# Altium schematic symbol library TIE_2025.SchLib: 42 symbols
Pins are listed as number, name and electrical type; pins without a type are passive.

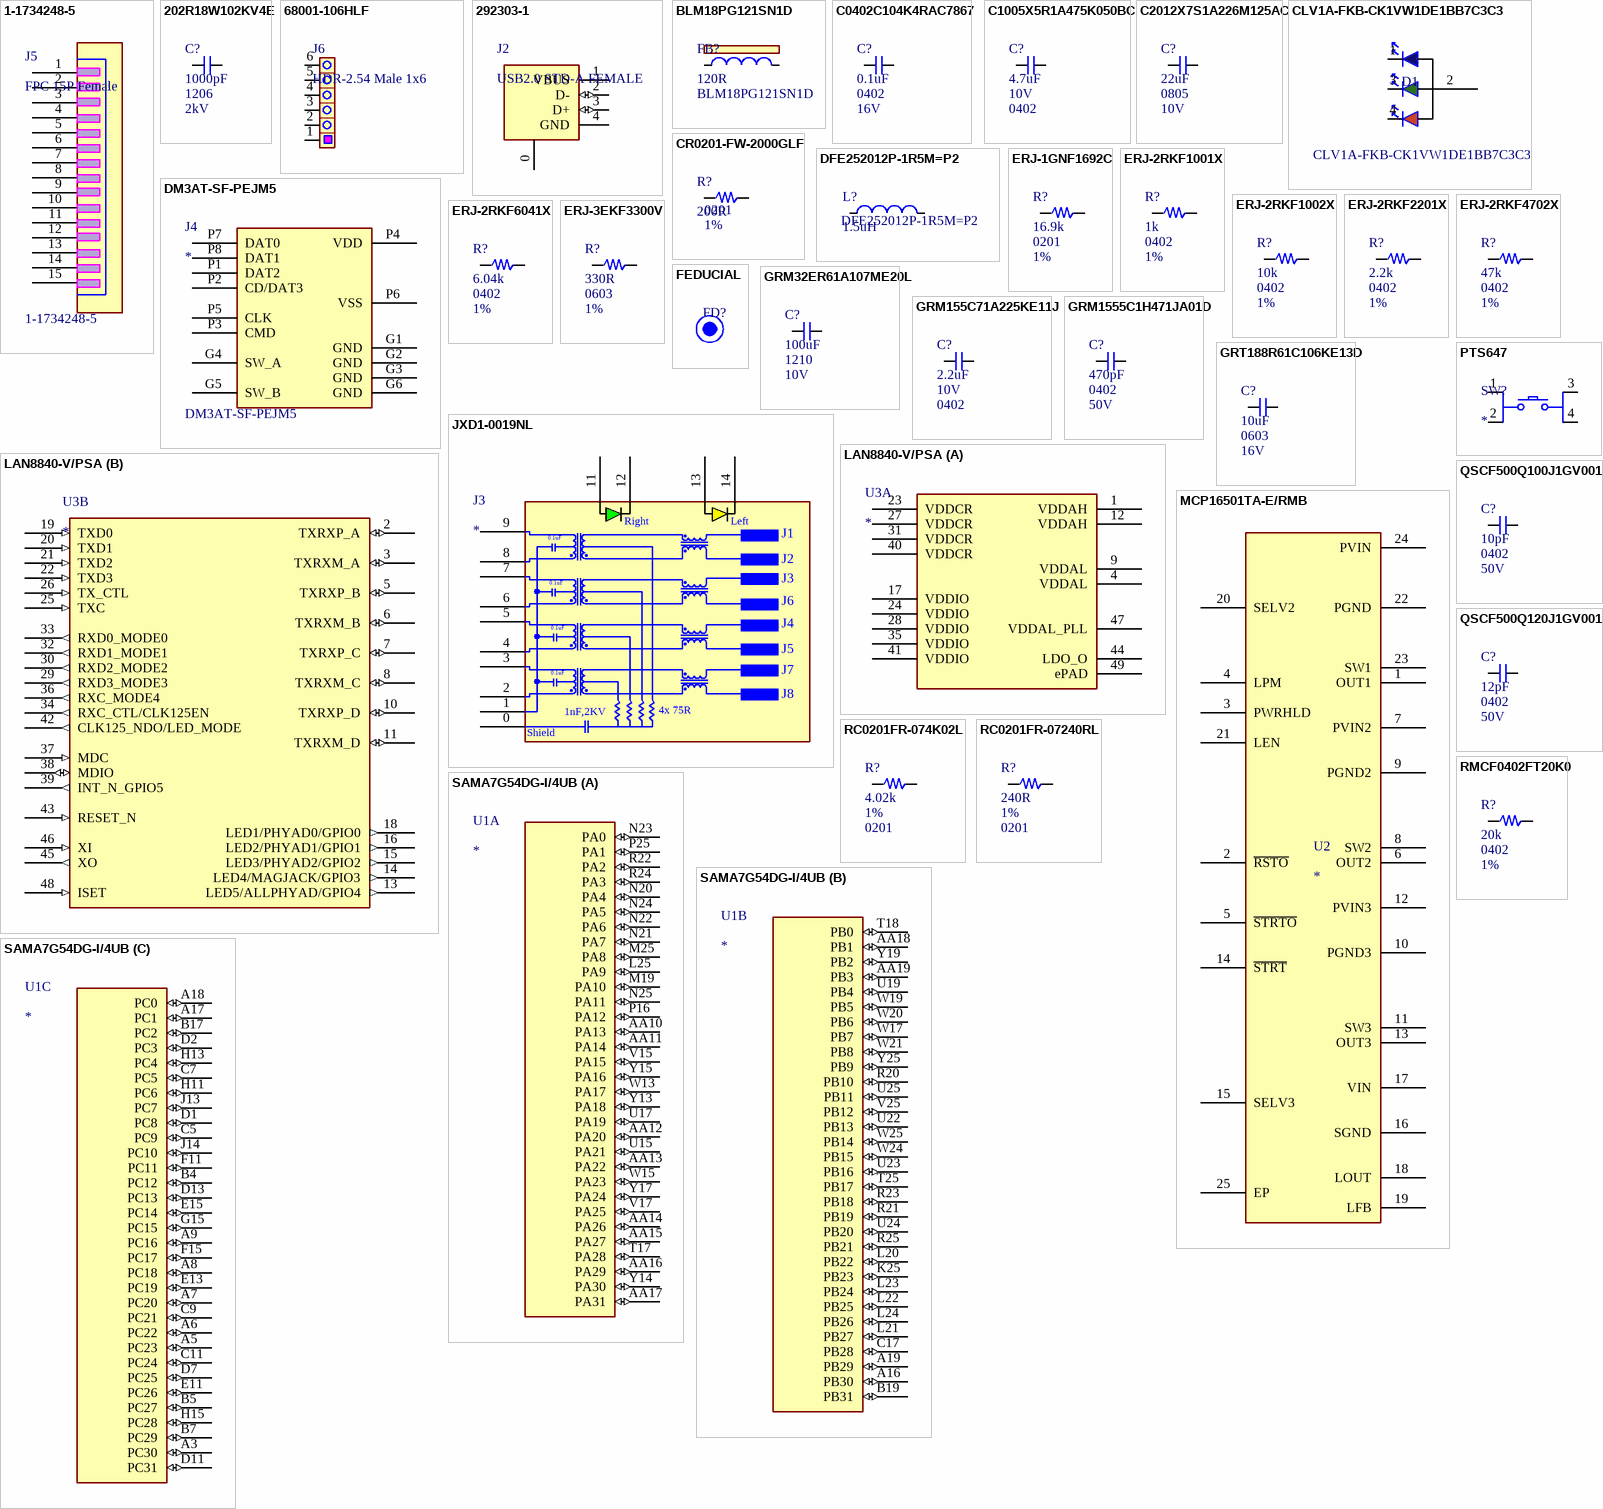
[diagram p0: symbols 1-1734248-5 to SAMA7G54DG-I/4UB]

## 1-1734248-5
designator J5, comment FPC 15P Female  Manufacturer Part Number: 1-1734248-5
CON FPC 1mm 15P Female SMD VERT; Manufacturer: TE Connectivity AMP
footprint 1-1734248-5_1 (CON FPC 1mm 15P Female SMD VERT)
pins: 1, 2, 3, 4, 5, 6, 7, 8, 9, 10, 11, 12, 13, 14, 15

## 202R18W102KV4E
designator C?, comment 1000pF  Rated Voltage: 2kV  Package: 1206
CAP CER 1000pF 2KV 10% X7R SMD 1206; Manufacturer: D3_Johanson Dielectrics Inc; Manufacturer Part Number: 202R18W102KV4E; .Checked_PCB: AI; .Checked_SCH: AI; .Creator: AI
footprint CAP1206
pins: 1, 2

## 68001-106HLF
designator J6, comment HDR-2.54 Male 1x6
CON HDR-2.54 Male 1x6 Gold 5.84MH TH VERT; Manufacturer: FCI; Manufacturer Part Number: 68001-106HLF
footprint 68001-106HLF
pins: 1, 2, 3, 4, 5, 6

## 292303-1
designator J2, comment USB2.0 STD-A FEMALE
CON USB2.0 STD-A FEMALE TH R/A; Manufacturer: TE Connectivity AMP; Manufacturer Part Number: 292303-1
footprint 292303-1
pins: 0   , 1 VBUS, 2 D- (io), 3 D+ (io), 4 GND

## BLM18PG121SN1D
designator FB?, comment 120R  Manufacturer Part Number: BLM18PG121SN1D
FERRITE BEAD 120 OHM 0603 1LN; Manufacturer: Murata; .Checked_PCB: AI; .Checked_SCH: AI; .Creator: AI
footprint FB0603
pins: 1, 2

## C0402C104K4RAC7867
designator C?, comment 0.1uF  Rated Voltage: 16V  Package: 0402
CAP CER 0.1uF 16V 10% X7R SMD 0402; Manufacturer: KEMET; Manufacturer Part Number: C0402C104K4RAC7867; .Checked_PCB: AI; .Checked_SCH: AI; .Creator: AI
footprint CAP0402
pins: 1, 2

## C1005X5R1A475K050BC
designator C?, comment 4.7uF  Package: 0402  Rated Voltage: 10V
CAP CER 4.7uF 10V 10% X5R SMD 0402; Manufacturer: TDK Corporation; Manufacturer Part Number: C1005X5R1A475K050BC; .Checked_PCB: AI; .Checked_SCH: AI; .Creator: AI
footprint CAP0402
pins: 1, 2

## C2012X7S1A226M125AC
designator C?, comment 22uF  Rated Voltage: 10V  Package: 0805
CAP CER 22uF 10V 20% X7S SMD 0805; Manufacturer: TDK Corporation; Manufacturer Part Number: C2012X7S1A226M125AC
footprint CAP0805
pins: 1, 2

## CLV1A-FKB-CK1VW1DE1BB7C3C3
designator D1, comment Manufacturer Part Number: CLV1A-FKB-CK1VW1DE1BB7C3C3  (hidden comment: APT1608SRCPRV)
DIO LED TRI RED, GREEN, BLUE 2V, 3.2V, 3.2V 20mA, 20mA, / 20mA SMD 4-PLCC; Manufacturer: Cree Inc.; .Checked_PCB: IC; .Checked_SCH: IC
footprint CLV1A-FKB-CK1VW1DE1BB7C3C3
pins: 1, 2, 3, 4

## CR0201-FW-2000GLF
designator R?, comment 200R  Tolerance: 1%  Package: 0201
RES TKF 200R 1% 1/20W SMD 0201; Manufacturer: Bourns Inc.; Manufacturer Part Number: CR0201-FW-2000GLF
footprint RES0201
pins: 1, 2

## DFE252012P-1R5M=P2
designator L?, comment 1.5uH  Manufacturer Part Number: DFE252012P-1R5M=P2
INDUCTOR 1.5uH 3.5A 20% SMD 1008; Manufacturer: Murata Electronics North; .Checked_PCB: AI; .Checked_SCH: AI; .Creator: AI; Parameter 1: *
footprint INDUCTOR1008
pins: 1, 2

## DM3AT-SF-PEJM5
designator J4  Manufacturer Part Number: DM3AT-SF-PEJM5
CON FLASH microSD 8+2P Push-Push SMD; Manufacturer: Hirose Electric Co Ltd
footprint DM3AT-SF-PEJM5
pins: G1 GND, G2 GND, G3 GND, G4 SW_A, G5 SW_B, G6 GND, P1 DAT2, P2 CD/DAT3, P3 CMD, P4 VDD, P5 CLK, P6 VSS, P7 DAT0, P8 DAT1

## ERJ-1GNF1692C
designator R?, comment 16.9k  Tolerance: 1%  Package: 0201
RES TKF 16.9k 1% 1/20W SMD 0201; Manufacturer: Panasonic Electronic; Manufacturer Part Number: ERJ-1GNF1692C
footprint RES0201
pins: 1, 2

## ERJ-2RKF1001X
designator R?, comment 1k  Tolerance: 1%  Package: 0402
RES TKF 1k 1% 1/10W SMD 0402; Manufacturer: Panasonic; Manufacturer Part Number: ERJ-2RKF1001X
footprint RES0402
pins: 1, 2

## ERJ-2RKF1002X
designator R?, comment 10k  Tolerance: 1%  Package: 0402
RES TKF 10k 1% 1/10W SMD 0402; Manufacturer: Panasonic; Manufacturer Part Number: ERJ-2RKF1002X
footprint RES0402
pins: 1, 2

## ERJ-2RKF2201X
designator R?, comment 2.2k  Tolerance: 1%  Package: 0402
RES TKF 2.2k 1% 1/10W SMD 0402; Manufacturer: Panasonic; Manufacturer Part Number: ERJ-2RKF2201X
footprint RES0402
pins: 1, 2

## ERJ-2RKF4702X
designator R?, comment 47k  Tolerance: 1%  Package: 0402
RES TKF 47k 1% 1/10W SMD 0402 AEC-Q200; Manufacturer: Panasonic - ECG; Manufacturer Part Number: ERJ-2RKF4702X
footprint RES0402
pins: 1, 2

## ERJ-2RKF6041X
designator R?, comment 6.04k  Tolerance: 1%  Package: 0402
RES TKF 6.04k 1% 1/10W SMD 0402 AEC-Q200; Manufacturer: Panasonic Electronic; Manufacturer Part Number: ERJ-2RKF6041X
footprint RES0402
pins: 1, 2

## ERJ-3EKF3300V
designator R?, comment 330R  Tolerance: 1%  Package: 0603
RES TKF 330R 1% 1/10W SMD 0603; Manufacturer: Panasonic; Manufacturer Part Number: ERJ-3EKF3300V; .Checked_PCB: IC; .Checked_SCH: IC; .Creator: IC
footprint RES0603
pins: 1, 2

## FEDUCIAL
designator FD?, comment FID1X2R  (value not drawn)  (no BOM)
FEDUCIAL; Manufacturer: NA; .Creator: Ionut Chirilus; Manufacturer Part Number: NA
footprint TestPoint

## GRM32ER61A107ME20L
designator C?, comment 100uF  Rated Voltage: 10V  Package: 1210
CAP CER 100uF 10V 20% X5R SMD 1210; Manufacturer: Murata Electronics North; Manufacturer Part Number: GRM32ER61A107ME20L; .Checked_PCB: IC; .Checked_SCH: IC
footprint CAP1210
pins: 1, 2

## GRM155C71A225KE11J
designator C?, comment 2.2uF  Package: 0402  Rated Voltage: 10V
CAP CER 2.2uF 10V 10% X7S SMD 0402; Manufacturer: Murata; Manufacturer Part Number: GRM155C71A225KE11J; .Checked_PCB: AI; .Checked_SCH: AI; .Creator: AI
footprint CAP0402
pins: 1, 2

## GRM1555C1H471JA01D
designator C?, comment 470pF  Rated Voltage: 50V  Package: 0402
CAP CER 470pF 50V 5% NP0 SMD 0402; Manufacturer: Murata; Manufacturer Part Number: GRM1555C1H471JA01D; .Checked_PCB: AI; .Checked_SCH: AI; .Creator: AI
footprint CAP0402
pins: 1, 2

## GRT188R61C106KE13D
designator C?, comment 10uF  Rated Voltage: 16V  Pacakage: 0603
CAP CER 10uF 16V 10% X5R SMD 0603 AEC-Q200; Manufacturer: Murata; Manufacturer Part Number: GRT188R61C106KE13D; .Checked_PCB: IC; .Checked_SCH: IC; .Creator: IC
footprint CAP0603
pins: 1, 2

## JXD1-0019NL
designator J3
CON MODULAR JACK RJ45 10/100/1000 MAGNETICS 2xLEDs / SHIELD TH R/A; Manufacturer: Pulse Electronics; Manufacturer Part Number: JXD1-0019NL
footprint JXD1-0019NL
pins: 0, 1, 2, 3, 4, 5, 6, 7, 8, 9, 11, 12, 13, 14
text: Right; Left; 0.1uF; J1; J2; J6; J4; J5; J7; J8; 1nF,2KV; 4x 75R; Shield

## LAN8840-V/PSA
designator U3
MCHP INTERFACE ETHERNET LAN8840 QFN-48; Manufacturer: Microchip Technology; Manufacturer Part Number: LAN8840-V/PSA
footprint QFN-48
part A pins: 1 VDDAH, 4 VDDAL, 9 VDDAL, 12 VDDAH, 17 VDDIO, 23 VDDCR, 24 VDDIO, 27 VDDCR, 28 VDDIO, 31 VDDCR, 35 VDDIO, 40 VDDCR, 41 VDDIO, 44 LDO_O, 47 VDDAL_PLL, 49 ePAD
part B pins: 2 TXRXP_A (io), 3 TXRXM_A (io), 5 TXRXP_B (io), 6 TXRXM_B (io), 7 TXRXP_C (io), 8 TXRXM_C (io), 10 TXRXP_D (io), 11 TXRXM_D (io), 13 LED5/ALLPHYAD/GPIO4 (out), 14 LED4/MAGJACK/GPIO3 (out), 15 LED3/PHYAD2/GPIO2 (out), 16 LED2/PHYAD1/GPIO1 (out), 18 LED1/PHYAD0/GPIO0 (out), 19 TXD0 (in), 20 TXD1 (in), 21 TXD2 (in), 22 TXD3 (in), 25 TXC (in), 26 TX_CTL (in), 29 RXD3_MODE3 (out), 30 RXD2_MODE2 (out), 32 RXD1_MODE1 (out), 33 RXD0_MODE0 (out), 34 RXC_CTL/CLK125EN (out), 36 RXC_MODE4 (out), 37 MDC (in), 38 MDIO (io), 39 INT_N_GPIO5 (out), 42 CLK125_NDO/LED_MODE (out), 43 RESET_N (in), 45 XO (out), 46 XI (in), 48 ISET (in)

## MCP16501TA-E/RMB
designator U2
MCHP ANALOG PMIC SWITCHER Buck ADJ MCP16501TA-E/RMB / QFN-24; Manufacturer: Microchip Technology; Manufacturer Part Number: MCP16501TA-E/RMB
footprint QFN-24
pins: 1 OUT1, 2 ~{RSTO}, 3 PWRHLD, 4 LPM, 5 ~{STRTO}, 6 OUT2, 7 PVIN2, 8 SW2, 9 PGND2, 10 PGND3, 11 SW3, 12 PVIN3, 13 OUT3, 14 ~{STRT}, 15 SELV3, 16 SGND, 17 VIN, 18 LOUT, 19 LFB, 20 SELV2, 21 LEN, 22 PGND, 23 SW1, 24 PVIN, 25 EP

## PTS647
designator SW?
SWITCH TACT SPST 12V 50mA PTS 647 SK38 SMTR2 LFSSMD; Manufacturer: C&K; Datasheet Link: https://datasheet.datasheetarchive.com/originals/distributors/Datasheets_SAMA/dda6c2a9a64375c9ffe9508ecade46cd.pdf; Height: 3.8mm; Arrow Part Number: PTS 647 SK38 SMTR2 LFS; Arrow Price/Stock: https://www.arrow.com/en/products/pts-647-sk38-smtr2-lfs/ck?region=europe; Manufacturer Part Number: PTS 647 SK38 SMTR2 LFS
footprint PTS 647 SK38 SMTR2 LFS
pins: 1, 2, 3, 4

## QSCF500Q100J1GV001T
designator C?, comment 10pF  Rated Voltage: 50V  Package: 0402
CAP CER 10pF 50V 5% C0G/NP0 SMD 0402; Manufacturer: Johanson Technology; Manufacturer Part Number: QSCF500Q100J1GV001T; .Checked_PCB: AI; .Checked_SCH: AI; .Creator: AI
footprint CAP0402
pins: 1, 2

## QSCF500Q120J1GV001T
designator C?, comment 12pF  Rated Voltage: 50V  Package: 0402
CAP CER 12pF 50V 5% C0G/NP0 SMD 0402; Manufacturer: Johanson Technology; Manufacturer Part Number: QSCF500Q120J1GV001T; .Checked_PCB: AI; .Checked_SCH: AI; .Creator: AI
footprint CAP0402
pins: 1, 2

## RC0201FR-074K02L
designator R?, comment 4.02k  Package: 0201  Tolerance: 1%
RES TKF 4.02k 1% 1/20W SMD 0201; Manufacturer: Yageo; Manufacturer Part Number: RC0201FR-074K02L
footprint RES0201
pins: 1, 2

## RC0201FR-07240RL
designator R?, comment 240R  Package: 0201  Tolerance: 1%
RES TKF 240R 1% 1/20W SMD 0201; Manufacturer: Yageo; Manufacturer Part Number: RC0201FR-07240RL
footprint RES0201
pins: 1, 2

## RMCF0402FT20K0
designator R?, comment 20k  Tolerance: 1%  Package: 0402
RES TKF 20k 1% 1/10W SMD 0402; Manufacturer: Stackpole Electronics Inc; Manufacturer Part Number: RMCF0402FT20K0
footprint RES0402
pins: 1, 2

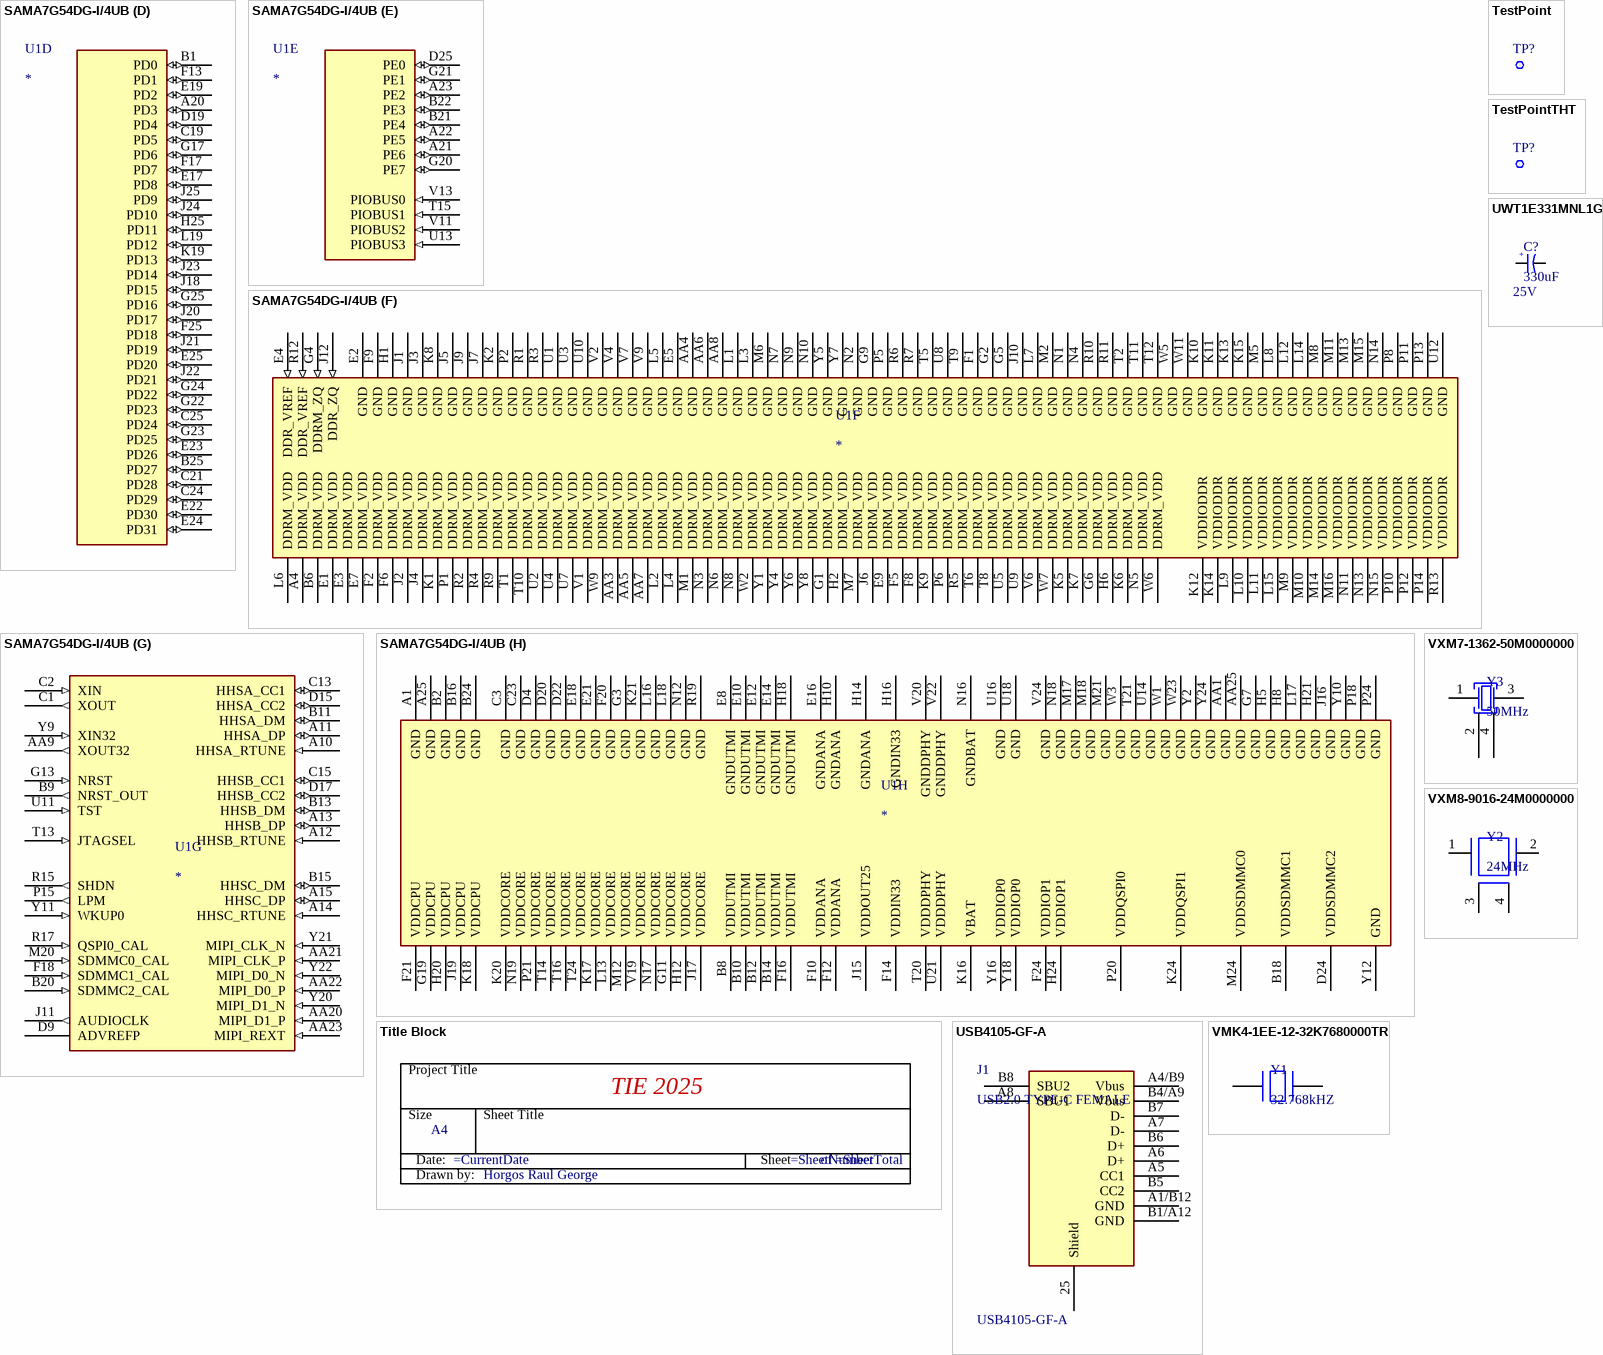
[diagram p1: symbols SAMA7G54DG-I/4UB to VXM8-9016-24M0000000]

## SAMA7G54DG-I/4UB
designator U1
MCHP MPU SiP 32-BIT Cortex-A7 1000MHz 128kB 2Gbit / SAMA7G54D2G-I/4UB LFBGA-427; Manufacturer: Microchip Technology; Manufacturer Part Number: SAMA7G54DG-I/4UB
footprint BGA427C80P25X21_2100X1800X120
part A pins: AA10 PA13 (io), AA11 PA14 (io), AA12 PA20 (io), AA13 PA22 (io), AA14 PA26 (io), AA15 PA27 (io), AA16 PA29 (io), AA17 PA31 (io), L25 PA9 (io), M19 PA10 (io), M25 PA8 (io), N20 PA4 (io), N21 PA7 (io), N22 PA6 (io), N23 PA0 (io), N24 PA5 (io), N25 PA11 (io), P16 PA12 (io), P25 PA1 (io), R22 PA2 (io), R24 PA3 (io), T17 PA28 (io), U15 PA21 (io), U17 PA19 (io), V15 PA15 (io), V17 PA25 (io), W13 PA17 (io), W15 PA23 (io), Y13 PA18 (io), Y14 PA30 (io), Y15 PA16 (io), Y17 PA24 (io)
part B pins: A16 PB30 (io), A19 PB29 (io), AA18 PB1 (io), AA19 PB3 (io), B19 PB31 (io), C17 PB28 (io), K25 PB23 (io), L20 PB22 (io), L21 PB27 (io), L22 PB25 (io), L23 PB24 (io), L24 PB26 (io), R20 PB10 (io), R21 PB19 (io), R23 PB18 (io), R25 PB21 (io), T18 PB0 (io), T25 PB17 (io), U19 PB4 (io), U22 PB13 (io), U23 PB16 (io), U24 PB20 (io), U25 PB11 (io), V25 PB12 (io), W17 PB7 (io), W19 PB5 (io), W20 PB6 (io), W21 PB8 (io), W24 PB15 (io), W25 PB14 (io), Y19 PB2 (io), Y25 PB9 (io)
part C pins: A3 PC30 (io), A5 PC23 (io), A6 PC22 (io), A7 PC20 (io), A8 PC18 (io), A9 PC16 (io), A17 PC1 (io), A18 PC0 (io), B4 PC12 (io), B5 PC27 (io), B7 PC29 (io), B17 PC2 (io), C5 PC9 (io), C7 PC5 (io), C9 PC21 (io), C11 PC24 (io), D1 PC8 (io), D2 PC3 (io), D7 PC25 (io), D11 PC31 (io), D13 PC13 (io), E11 PC26 (io), E13 PC19 (io), E15 PC14 (io), F11 PC11 (io), F15 PC17 (io), G15 PC15 (io), H11 PC6 (io), H13 PC4 (io), H15 PC28 (io), J13 PC7 (io), J14 PC10 (io)
part D pins: A20 PD3 (io), B1 PD0 (io), B25 PD27 (io), C19 PD5 (io), C21 PD28 (io), C24 PD29 (io), C25 PD24 (io), D19 PD4 (io), E17 PD8 (io), E19 PD2 (io), E22 PD30 (io), E23 PD26 (io), E24 PD31 (io), E25 PD20 (io), F13 PD1 (io), F17 PD7 (io), F25 PD18 (io), G17 PD6 (io), G22 PD23 (io), G23 PD25 (io), G24 PD22 (io), G25 PD16 (io), H25 PD11 (io), J18 PD15 (io), J20 PD17 (io), J21 PD19 (io), J22 PD21 (io), J23 PD14 (io), J24 PD10 (io), J25 PD9 (io), K19 PD13 (io), L19 PD12 (io)
part E pins: A21 PE6 (io), A22 PE5 (io), A23 PE2 (io), B21 PE4 (io), B22 PE3 (io), D25 PE0 (io), G20 PE7 (io), G21 PE1 (io), T15 PIOBUS1 (in), U13 PIOBUS3 (in), V11 PIOBUS2 (in), V13 PIOBUS0 (in)
part F pins: A4 DDRM_VDD, AA3 DDRM_VDD, AA4 GND, AA5 DDRM_VDD, AA6 GND, AA7 DDRM_VDD, AA8 GND, B6 DDRM_VDD, E1 DDRM_VDD, E2 GND, E3 DDRM_VDD, E4 DDR_VREF (in), E5 GND, E7 DDRM_VDD, E9 DDRM_VDD, F1 GND, F2 DDRM_VDD, F5 DDRM_VDD, F6 DDRM_VDD, F8 DDRM_VDD, F9 GND, G1 DDRM_VDD, G2 GND, G4 DDRM_ZQ (in), G5 GND, G6 DDRM_VDD, G9 GND, H1 GND, H2 DDRM_VDD, H6 DDRM_VDD, J1 GND, J2 DDRM_VDD, J3 GND, J4 DDRM_VDD, J5 GND, J6 DDRM_VDD, J7 GND, J9 GND, J10 GND, J12 DDR_ZQ (in), K1 DDRM_VDD, K2 GND, K5 DDRM_VDD, K6 DDRM_VDD, K7 DDRM_VDD, K8 GND, K9 DDRM_VDD, K10 GND, K11 GND, K12 VDDIODDR, K13 GND, K14 VDDIODDR, K15 GND, L1 GND, L2 DDRM_VDD, L3 GND, L4 DDRM_VDD, L5 GND, L6 DDRM_VDD, L7 GND, L8 GND, L9 VDDIODDR, L10 VDDIODDR, L11 VDDIODDR, L12 GND, L14 GND, L15 VDDIODDR, M1 DDRM_VDD, M2 GND, M5 GND, M6 GND, M7 DDRM_VDD, M8 GND, M9 VDDIODDR, M10 VDDIODDR, M11 GND, M13 GND, M14 VDDIODDR, M15 GND, M16 VDDIODDR, N1 GND, N2 GND, N3 DDRM_VDD, N4 GND, N5 DDRM_VDD, N6 DDRM_VDD, N7 GND, N8 DDRM_VDD, N9 GND, N10 GND, N11 VDDIODDR, N13 VDDIODDR, N14 GND, N15 VDDIODDR, P1 DDRM_VDD, P2 GND, P5 GND, P6 DDRM_VDD, P8 GND, P10 VDDIODDR, P11 GND, P12 VDDIODDR, P13 GND, P14 VDDIODDR, R1 GND, R2 DDRM_VDD, R3 GND, R4 DDRM_VDD, R5 DDRM_VDD, R6 GND, R7 GND, R9 DDRM_VDD, R10 GND, R11 GND, R12 DDR_VREF (in), R13 VDDIODDR, T1 DDRM_VDD, T2 GND, T5 GND, T6 DDRM_VDD, T8 DDRM_VDD, T9 GND, T10 DDRM_VDD, T11 GND, T12 GND, U1 GND, U2 DDRM_VDD, U3 GND, U4 DDRM_VDD, U5 DDRM_VDD, U7 DDRM_VDD, U8 GND, U9 DDRM_VDD, U10 GND, U12 GND, V1 DDRM_VDD, V2 GND, V4 GND, V6 DDRM_VDD, V7 GND, V9 GND, W2 DDRM_VDD, W5 GND, W6 DDRM_VDD, W7 DDRM_VDD, W9 DDRM_VDD, W11 GND, Y1 DDRM_VDD, Y4 DDRM_VDD, Y5 GND, Y6 DDRM_VDD, Y7 GND, Y8 DDRM_VDD
part G pins: A10 HHSA_RTUNE (in), A11 HHSA_DP (io), A12 HHSB_RTUNE (in), A13 HHSB_DP (io), A14 HHSC_RTUNE (in), A15 HHSC_DP (io), AA9 XOUT32 (out), AA20 MIPI_D1_P (in), AA21 MIPI_CLK_P (in), AA22 MIPI_D0_P (in), AA23 MIPI_REXT (in), B9 NRST_OUT (out), B11 HHSA_DM (io), B13 HHSB_DM (io), B15 HHSC_DM (io), B20 SDMMC2_CAL (in), C1 XOUT (out), C2 XIN (in), C13 HHSA_CC1 (io), C15 HHSB_CC1 (io), D9 ADVREFP, D15 HHSA_CC2 (io), D17 HHSB_CC2 (io), F18 SDMMC1_CAL (in), G13 NRST (in), J11 AUDIOCLK (out), M20 SDMMC0_CAL (in), P15 LPM (out), R15 SHDN (out), R17 QSPI0_CAL (in), T13 JTAGSEL (in), U11 TST (in), Y9 XIN32 (in), Y11 WKUP0 (in), Y20 MIPI_D1_N (in), Y21 MIPI_CLK_N (in), Y22 MIPI_D0_N (in)
part H pins: A1 GND, A25 GND, AA1 GND, AA25 GND, B2 GND, B8 VDDUTMI, B10 VDDUTMI, B12 VDDUTMI, B14 VDDUTMI, B16 GND, B18 VDDSDMMC1, B24 GND, C3 GND, C23 GND, D4 GND, D20 GND, D22 GND, D24 VDDSDMMC2, E8 GNDUTMI, E10 GNDUTMI, E12 GNDUTMI, E14 GNDUTMI, E16 GNDANA, E18 GND, E21 GND, F10 VDDANA, F12 VDDANA, F14 VDDIN33, F16 VDDUTMI, F20 GND, F21 VDDCPU, F24 VDDIOP1, G3 GND, G7 GND, G11 VDDCORE, G19 VDDCPU, H5 GND, H8 GND, H10 GNDANA, H12 VDDCORE, H14 GNDANA, H16 GNDIN33, H18 GNDUTMI, H20 VDDCPU, H21 GND, H24 VDDIOP1, J15 VDDOUT25, J16 GND, J17 VDDCORE, J19 VDDCPU, K16 VBAT, K17 VDDCORE, K18 VDDCPU, K20 VDDCORE, K21 GND, K24 VDDQSPI1, L13 VDDCORE, L16 GND, L17 GND, L18 GND, M12 VDDCORE, M17 GND, M18 GND, M21 GND, M24 VDDSDMMC0, N12 GND, N16 GNDBAT, N17 VDDCORE, N18 GND, N19 VDDCORE, P18 GND, P20 VDDQSPI0, P21 VDDCORE, P24 GND, R19 GND, T14 VDDCORE, T16 VDDCORE, T20 VDDDPHY, T21 GND, T24 VDDCORE, U14 GND, U16 GND, U18 GND, U21 VDDDPHY, V19 VDDCORE, V20 GNDDPHY, V22 GNDDPHY, V24 GND, W1 GND, W3 GND, W23 GND, Y2 GND, Y10 GND, Y12 GND, Y16 VDDIOP0, Y18 VDDIOP0, Y24 GND

## TestPoint
designator TP?  (value not drawn)  (no BOM)
SMD test point; Manufacturer: NA; .Checked_PCB: AI; .Creator: RV; .Checked_SCH: AI; Manufacturer Part Number: NA
footprint TestPoint
pins: 1

## TestPointTHT
designator TP?  (value not drawn)  (no BOM)
THT 1.6mm test point; Manufacturer: NA; Manufacturer Part Number: NA
footprint THT-1.6MM
pins: 1

## Title Block
designator *  (value not drawn)  (graphical)
text: Project Title; TIE 2025; Size; Sheet Title; A4; Date:; Sheet; of; Drawn by:; Horgos Raul George

## USB4105-GF-A
designator J1, comment USB2.0 TYPE-C FEMALE  Manufacturer Part Number: USB4105-GF-A
CONN USB2.0 TYPE-C Female SMD/TH R/A; Manufacturer: GCT
footprint USB4105-GF-A
pins: 25 Shield, A1/B12 GND, A4/B9 Vbus, A5 CC1, A6 D+, A7 D-, A8 SBU1, B1/A12 GND, B4/A9 Vbus, B5 CC2, B6 D+, B7 D-, B8 SBU2

## UWT1E331MNL1GS
designator C?, comment 330uF  Rated Voltage: 25V
CAP ALU 330uF 25V 20% SMD F; Manufacturer: Nichicon; Manufacturer Part Number: UWT1E331MNL1GS
footprint CAP ALU
pins: 1, 2
text: +

## VMK4-1EE-12-32K7680000TR
designator Y1, comment 32.768kHZ
MCHP CRYSTAL 32.768kHz 12.5pF VMK4-1EE-12-32K7680000TR / SMD L2.0W1.2H0.5; Manufacturer: Microchip Technology; Manufacturer Part Number: VMK4-1EE-12-32K7680000TR
footprint VMK4-1EE-12-32K7680000TR
pins: 1, 2

## VXM7-1362-50M0000000
designator Y3, comment 50MHz
MCHP CRYSTAL 50MHz VXM7-1362-50M0000000 SMD / L3.2W2.5H0.8; Manufacturer: Microchip Technology; Manufacturer Part Number: VXM7-1362-50M0000000
footprint VXM7-1362-50M0000000
pins: 1, 2 4, 3, 4 5

## VXM8-9016-24M0000000
designator Y2, comment 24MHz
MCHP CRYSTAL 24MHz 10pF VXM8-9016-24M000000 SMD / L2.5W2H0.55; Manufacturer: Microchip Technology; Manufacturer Part Number: VXM8-9016-24M0000000
footprint VXM8-9016-24M0000000
pins: 1, 2, 3, 4